# Altium schematic symbol library SN74AXC8T245PWR.SchLib: 1 symbol
Pins are listed as number, name and electrical type; pins without a type are passive.

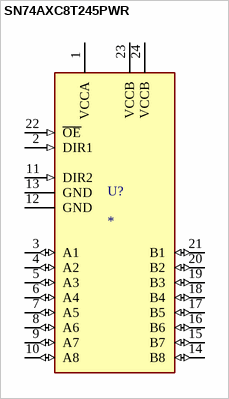
[diagram p0: symbol SN74AXC8T245PWR]

## SN74AXC8T245PWR
designator U?
8-bit dual-supply bus transceiver; MF: Texas Instruments; MP: SN74AXC8T245PWR; SnapEDA_Link: https://www.snapeda.com/parts/SN74AXC8T245PWR/Texas+Instruments/view-part/?ref=snap; Package: TSSOP-24 Texas Instruments; Value: *; Check_prices: https://www.snapeda.com/parts/SN74AXC8T245PWR/Texas+Instruments/view-part/?ref=eda; ComponentLink1Description: Digikey link; ComponentLink1URL: SN74AXC8T245PWR
footprint SOP65P640X120-24N
pins: 1 VCCA (power), 2 DIR1 (in), 3 A1 (io), 4 A2 (io), 5 A3 (io), 6 A4 (io), 7 A5 (io), 8 A6 (io), 9 A7 (io), 10 A8 (io), 11 DIR2 (in), 12 GND (power), 13 GND (power), 14 B8 (io), 15 B7 (io), 16 B6 (io), 17 B5 (io), 18 B4 (io), 19 B3 (io), 20 B2 (io), 21 B1 (io), 22 ~{OE} (in), 23 VCCB (power), 24 VCCB (power)